# EAGLE library part ADE-5+ (library ADE-5+)
RF Mixer DBL BAL MIX / SURF MT / RoHS Source: Datasheet <https://www.minicircuits.com/pdfs/ADE-5 .pdf>
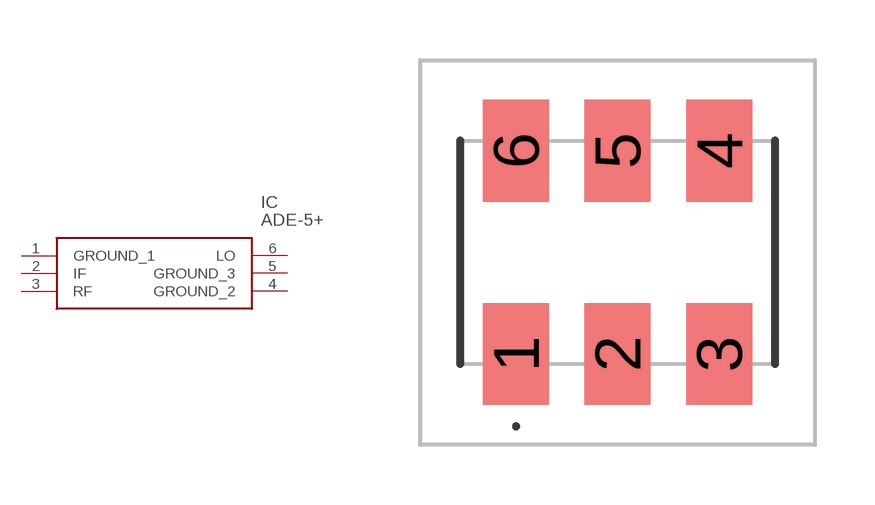
[diagram p0: symbol with the pads of ADE5; footprint ADE5]

Designator prefix IC

## ADE-5+ (Description: RF Mixer DBL BAL MIX / SURF MT / RoHS; Height: 2.84mm; Manufacturer_Name: Mini-Circuits; Manufacturer_Part_Number: ADE-5+; Mouser_Part_Number: 139-ADE-5; Mouser_Price-Stock: https://www.mouser.co.uk/ProductDetail/Mini-Circuits/ADE-5%2b?qs=xZ%2FP%252Ba9zWqYmwk%2F%2Fds48gw%3D%3D)  [ADE5]
1  GROUND_1
2  IF
3  RF
4  GROUND_2
5  GROUND_3
6  LO

## Footprint ADE5 (pad centres in mm)
ADE-5+-2
smd 1.65 x 2.54: 1 -2.54,-2.54; 2 0,-2.54; 3 2.54,-2.54; 4 2.54,2.54; 5 0,2.54; 6 -2.54,2.54